# Altium schematic symbol library Centralize.SchLib: 1081 symbols (part 22 of 26)
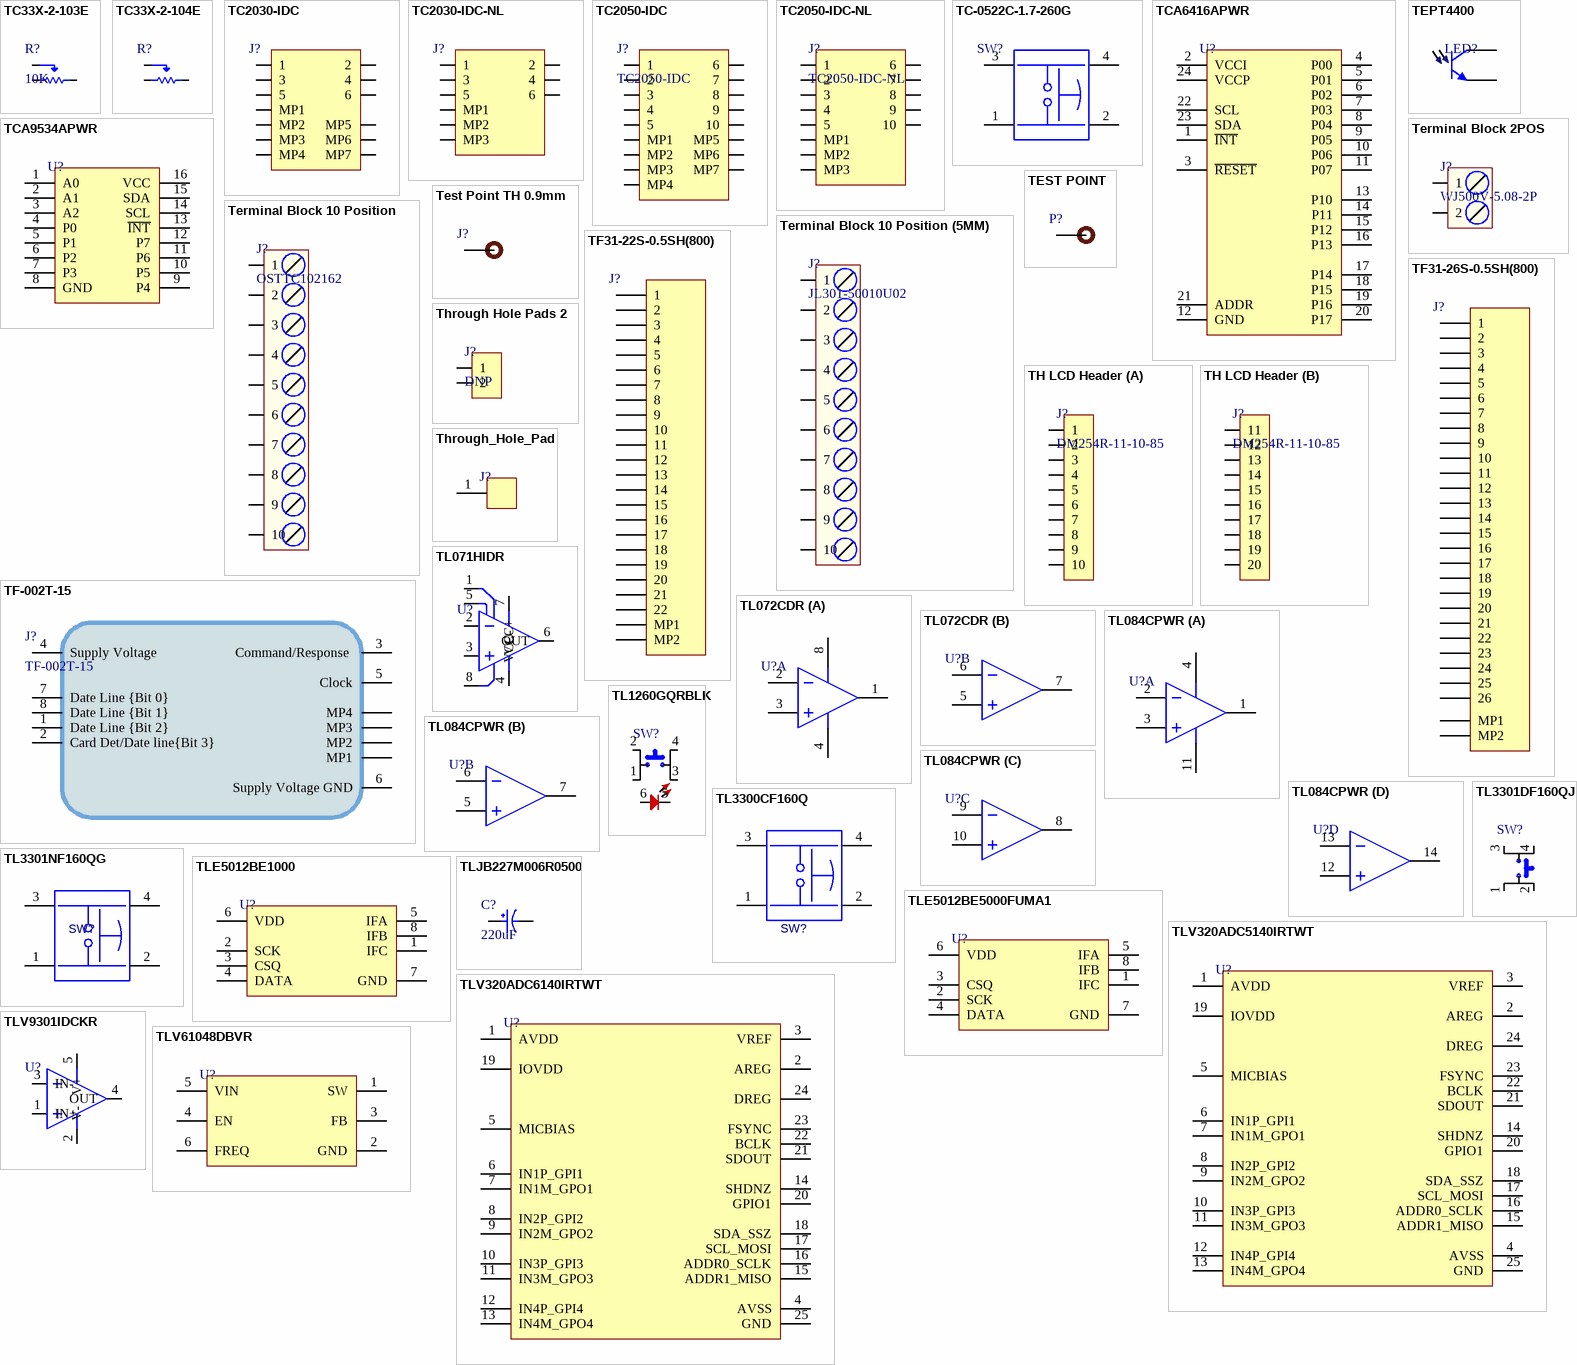
[diagram p68: symbols TC33X-2-103E to TLV61048DBVR]

## TLJB227M006R0500
designator C?, comment 220uF
CAP TANT 220UF 20% 6.3V SMD; Manufacturer: Kyocera AVX; Manufacturer Part Number: TLJB227M006R0500; Dielectric Material: Tantalum; Ripple Current: 412mA; ESR (Equivalent Series Resistance): 500mR; Leakage Current: 13.2uA; Polarity: Polar; Item Type: Capacitor; Supplier 1: Arrow Electronics; RoHS: Yes; Category: Tantalum Capacitors; Stock 1: 2000; Pricing 1: 2000=0.5308 (USD); Mounting Technology: Surface Mount; Case/Package: 1210; Pins: 2; Case Code (Imperial): 1411; Case Code (Metric): 3528; Min Operating Temperature: -55°C; Max Operating Temperature: 125°C; Package Quantity: 2000; Voltage Rating: 6.3V; Tolerance: 20%; Packaging: Tape and Reel; Value: 220uF; Termination: SMD/SMT; Voltage Rating (DC): 6.3V; Features: General Purpose; Series: TLJ; Construction: Flat; Length: 3.5mm; Width: 2.8mm; Height: 2.1mm; Height - Seated (Max): 0.083inch; Depth: 2.8mm; Radiation Hardening: No; Reach SVHC Compliant: No; RoHS Compliant: Yes; ComponentLink1URL: https://datasheet.ciiva.com/7773/tlj-7773835.pdf?src-supplier=Element14; ComponentLink1Description: https://datasheet.ciiva.com/7773/tlj-7773835.pdf?src-supplier=Element14; ComponentLink2URL: https://datasheet.ciiva.com/7773/tlj-7773836.pdf?src-supplier=Element14; ComponentLink2Description: https://datasheet.ciiva.com/7773/tlj-7773836.pdf?src-supplier=Element14; ComponentLink3URL: https://datasheet.ciiva.com/12911/tlj-35067-12911143.pdf?src-supplier=Mouser; ComponentLink3Description: https://datasheet.ciiva.com/12911/tlj-35067-12911143.pdf?src-supplier=Mouser; ComponentLink4URL: https://datasheet.ciiva.com/11229/tlj-11229391.pdf?src-supplier=Avnet; ComponentLink4Description: https://datasheet.ciiva.com/11229/tlj-11229391.pdf?src-supplier=Avnet; ComponentLink5URL: https://datasheet.ciiva.com/6238/tlj-6238526.pdf?src-supplier=Digi-Key; ComponentLink5Description: https://datasheet.ciiva.com/6238/tlj-6238526.pdf?src-supplier=Digi-Key; Supplier Part Number 1: TLJB227M006R0500; LCSC Part Number: C30242
footprint Case-B
pins: 1, 2

## TLV320ADC5140IRTWT
designator U?
IC ADC AUDIO 768K 24WQFN; Manufacturer: Texas Instruments; Manufacturer Part Number: TLV320ADC5140IRTWT; Supplier 1: Digi-Key; RoHS: Yes; Stock 1: 40; Pricing 1: 1=6.07000, 10=5.44900, 25=5.15160, 100=4.46470 (USD); RoHS Compliant: Yes; ComponentLink1URL: http://www.ti.com/general/docs/suppproductinfo.tsp?distId=10&amp;gotoUrl=http%3A%2F%2Fwww.ti.com%2Flit%2Fgpn%2Ftlv320adc5140&src-supplier=Digi-Key; ComponentLink1Description: http://www.ti.com/general/docs/suppproductinfo.tsp?distId=10&amp;gotoUrl=http%3A%2F%2Fwww.ti.com%2Flit%2Fgpn%2Ftlv320adc5140&src-supplier=Digi-Key; Supplier Part Number 1: 296-TLV320ADC5140IRTWTCT-ND; LCSC Part Number: C1852018; Item Type: IC
footprint 24-WQFN (4x4)
pins: 1 AVDD, 2 AREG, 3 VREF, 4 AVSS, 5 MICBIAS, 6 IN1P_GPI1, 7 IN1M_GPO1, 8 IN2P_GPI2, 9 IN2M_GPO2, 10 IN3P_GPI3, 11 IN3M_GPO3, 12 IN4P_GPI4, 13 IN4M_GPO4, 14 SHDNZ, 15 ADDR1_MISO, 16 ADDR0_SCLK, 17 SCL_MOSI, 18 SDA_SSZ, 19 IOVDD, 20 GPIO1, 21 SDOUT, 22 BCLK, 23 FSYNC, 24 DREG, 25 GND

## TLV320ADC6140IRTWT
designator U?
IC ADC AUDIO 768K 24WQFN; Manufacturer: Texas Instruments; Manufacturer Part Number: TLV320ADC6140IRTWT; Supplier 1: Digi-Key; RoHS: Yes; Category: Amplifiers - Audio; Stock 1: 4324; Pricing 1: 1=13.36000, 10=12.27500, 25=11.76600, 100=10.36680 (USD); ComponentLink1URL: http://www.ti.com/general/docs/suppproductinfo.tsp?distId=10&amp;gotoUrl=http%3A%2F%2Fwww.ti.com%2Flit%2Fgpn%2Ftlv320adc6140&src-supplier=Digi-Key; ComponentLink1Description: http://www.ti.com/general/docs/suppproductinfo.tsp?distId=10&amp;gotoUrl=http%3A%2F%2Fwww.ti.com%2Flit%2Fgpn%2Ftlv320adc6140&src-supplier=Digi-Key; Supplier Part Number 1: 296-TLV320ADC6140IRTWTCT-ND; LCSC Part Number: C1852023; Item Type: IC
footprint 24-WQFN (4x4)
pins: 1 AVDD, 2 AREG, 3 VREF, 4 AVSS, 5 MICBIAS, 6 IN1P_GPI1, 7 IN1M_GPO1, 8 IN2P_GPI2, 9 IN2M_GPO2, 10 IN3P_GPI3, 11 IN3M_GPO3, 12 IN4P_GPI4, 13 IN4M_GPO4, 14 SHDNZ, 15 ADDR1_MISO, 16 ADDR0_SCLK, 17 SCL_MOSI, 18 SDA_SSZ, 19 IOVDD, 20 GPIO1, 21 SDOUT, 22 BCLK, 23 FSYNC, 24 DREG, 25 GND

## TLV9301IDCKR
designator U?
IC OPAMP GP 1 CIRCUIT SC70-5; Manufacturer: Texas Instruments; Manufacturer Part Number: TLV9301IDCKR; Supplier 1: Mouser; RoHS: No; Category: Amplifiers - Op Amps, Buffer, Instrumentation; Stock 1: 29098; Pricing 1: 1=0.67, 10=0.562, 50=0.562, 100=0.445, 1000=0.284, 10000=0.283 (USD); Supplier Part Number 1: 595-TLV9301IDCKR; LCSC Part Number: C4366617; Item Type: IC
footprint SC-70-5
pins: 1 IN+, 2 V- (power), 3 IN-, 4 OUT, 5 V+ (power)

## TLV61048DBVR
designator U?
IC REG BOOST ADJ SOT23-6; Manufacturer: Texas Instruments; Manufacturer Part Number: TLV61048DBVR; Supplier 1: Arrow Electronics; RoHS: Yes; Category: Voltage Regulators - Switching; Stock 1: 2900; Pricing 1: 1=1.50040, 10=1.27670, 25=1.22540, 100=1.02980, 250=0.96320, 500=0.86780, 1000=0.76510 (USD); ComponentLink1URL: http://www.ti.com/general/docs/suppproductinfo.tsp?distId=10&amp;gotoUrl=http%3A%2F%2Fwww.ti.com%2Flit%2Fgpn%2Ftlv61048&src-supplier=Digi-Key; ComponentLink1Description: http://www.ti.com/general/docs/suppproductinfo.tsp?distId=10&amp;gotoUrl=http%3A%2F%2Fwww.ti.com%2Flit%2Fgpn%2Ftlv61048&src-supplier=Digi-Key; Supplier Part Number 1: TLV61048DBVR; Item Type: IC
footprint SOT-23-6
pins: 1 SW, 2 GND, 3 FB, 4 EN, 5 VIN, 6 FREQ

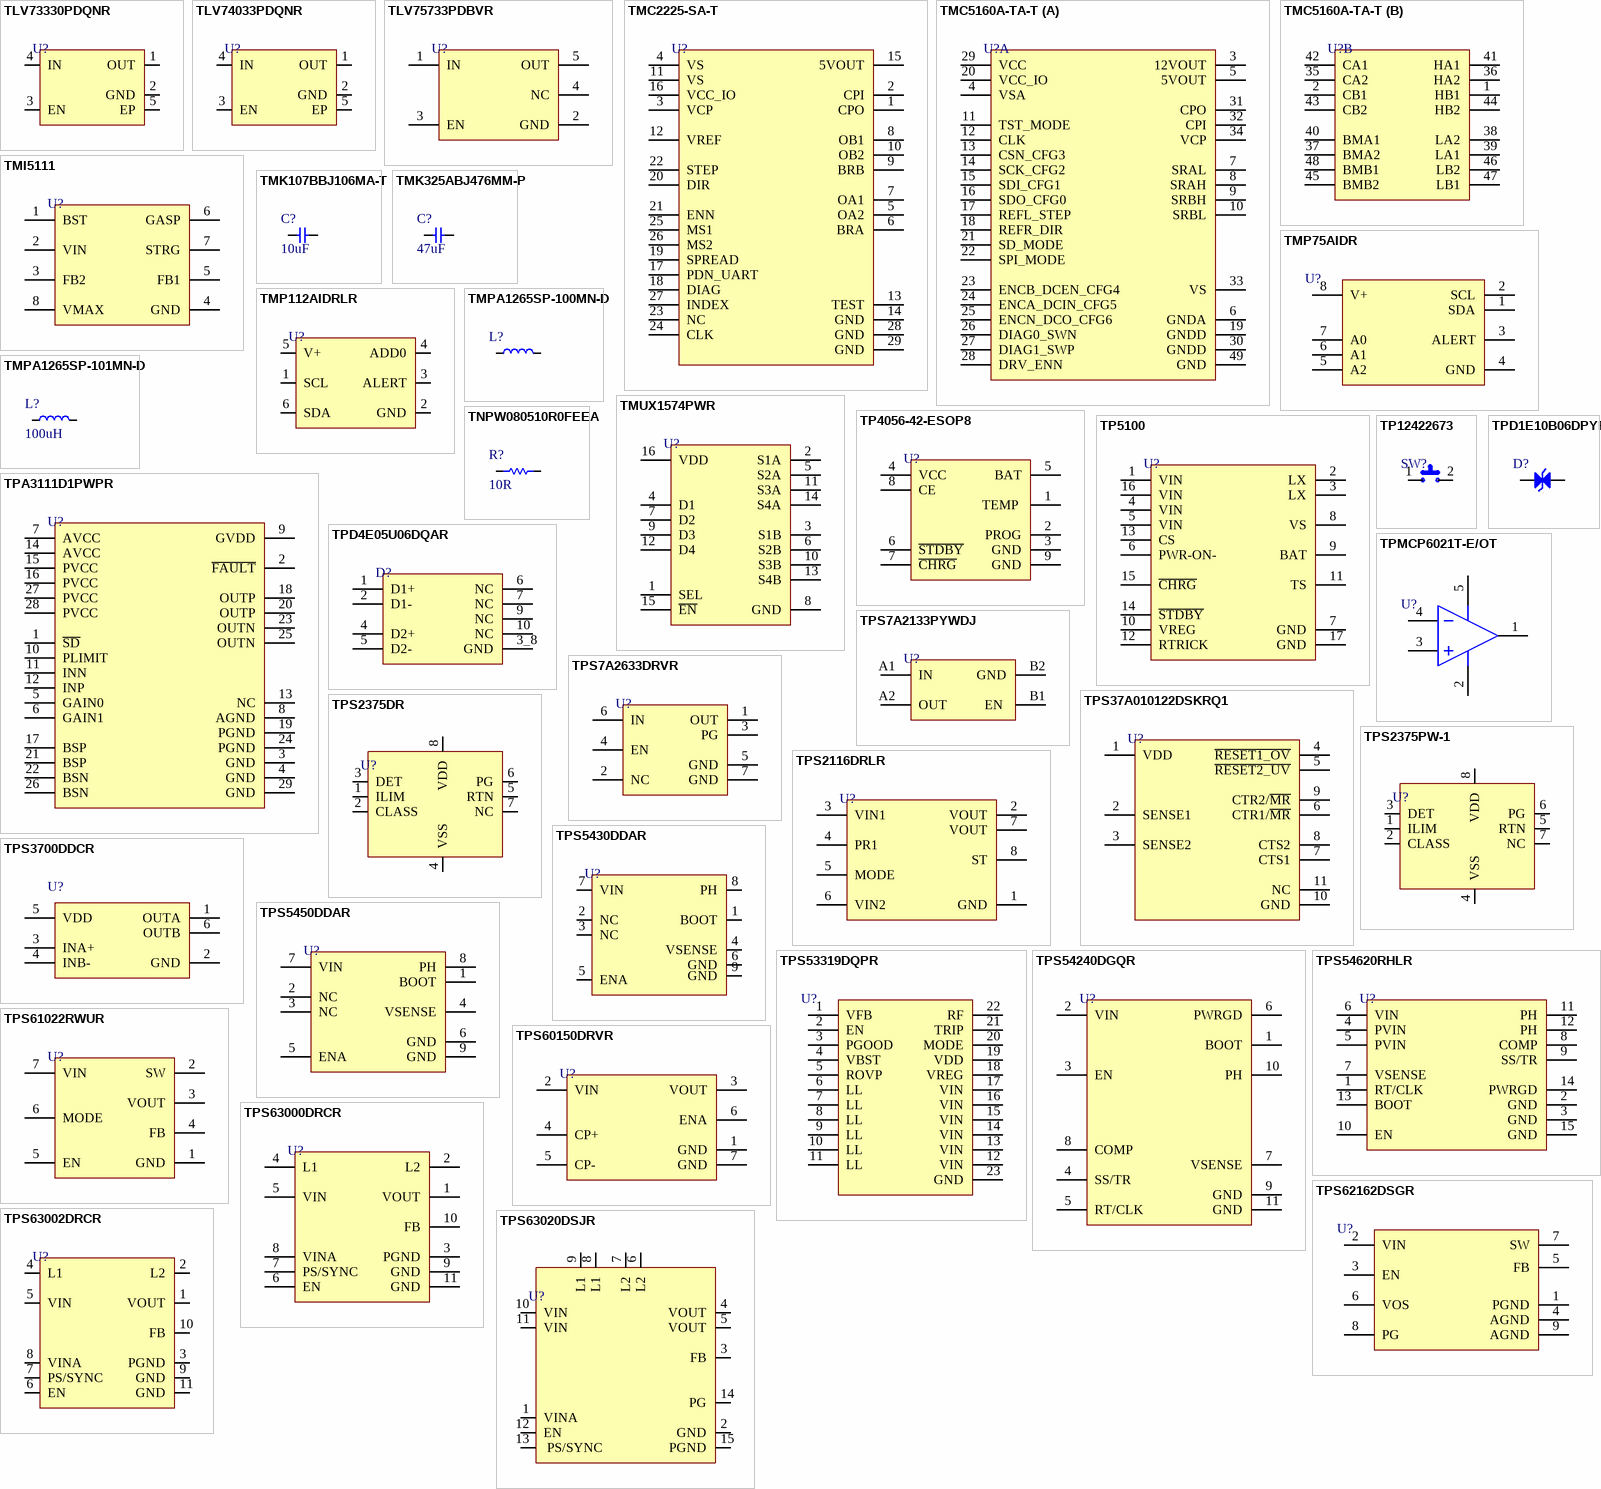
[diagram p42: symbols TLV73330PDQNR to TPS63020DSJR]

## TLV73330PDQNR
designator U?
IC REG LINEAR 3V 300MA 4X2SON; Manufacturer: Texas Instruments; Manufacturer Part Number: TLV73330PDQNR; Supplier: Mouser; Supplier Part Number: 595-TLV73330PDQNR; RoHS: Yes; Category: Voltage Regulators - Linear; Stock: 14746; Pricing: 1=0.39, 10=0.255, 50=0.255, 100=0.137, 1000=0.084, 10000=0.058 (USD); ComponentLink1URL: http://www.ti.com/general/docs/suppproductinfo.tsp?distId=10&amp;gotoUrl=http%3A%2F%2Fwww.ti.com%2Flit%2Fgpn%2Ftlv733p&src-supplier=Digi-Key; ComponentLink1Description: http://www.ti.com/general/docs/suppproductinfo.tsp?distId=10&amp;gotoUrl=http%3A%2F%2Fwww.ti.com%2Flit%2Fgpn%2Ftlv733p&src-supplier=Digi-Key; LCSC Part Number: C2870830; Item Type: IC
footprint X2-SON-4(1x1)
pins: 1 OUT, 2 GND, 3 EN, 4 IN, 5 EP

## TLV74033PDQNR
designator U?
IC REG LIN 3.3V 300MA 4X2SON; Manufacturer: Texas Instruments; Manufacturer Part Number: TLV74033PDQNR; Supplier: Mouser; Supplier Part Number: 595-TLV74033PDQNR; RoHS: No; Category: Integrated Circuits (ICs); Stock: 23519; Pricing: 1=0.25, 10=0.205, 50=0.205, 100=0.096, 1000=0.049, 10000=0.033 (USD); LCSC Part Number: C3746074; Item Type: IC
footprint X2-SON-4(1x1)
pins: 1 OUT, 2 GND, 3 EN, 4 IN, 5 EP

## TLV75733PDBVR
designator U?
IC REG LINEAR 3.3V 1A SOT23-5; Manufacturer: Texas Instruments; Manufacturer Part Number: TLV75733PDBVR; Output Type: Fixed; Capacitance: 33nF; Tolerance: 20%; Voltage Rating: 50V; Output Configuration: Positive; Number of Regulators: 1; Max Input Voltage: 5.5V; Dropout Voltage: 475mV; Max Supply Current: 40uA; Power Supply Rejection Ratio (PSRR): 52dB; Supplier 1: Mouser; RoHS: Yes; Category: Voltage Regulators - Linear; Pricing 1: 1=0.68000, 10=0.58100, 50=0.58100, 100=0.40300, 500=0.34100, 1000=0.26400, 3000=0.23900, 10000=0.23900 (USD); Mount: Surface Mount; Case/Package: 1206; Min Operating Temperature: -40°C; Max Operating Temperature: 125°C; Packaging: Tape and Reel; Min Output Voltage: 3.3V; Output Current: 1A; Ratings: AEC-Q200; RoHS Compliant: Yes; ComponentLink1URL: http://www.ti.com/lit/ds/symlink/tlv757p.pdf?src-supplier=Digi-Key; ComponentLink1Description: http://www.ti.com/lit/ds/symlink/tlv757p.pdf?src-supplier=Digi-Key; Supplier Part Number 1: 595-TLV75733PDBVR; LCSC Part Number: C485517; Item Type: IC
footprint SOT-23-5
pins: 1 IN, 2 GND, 3 EN, 4 NC, 5 OUT

## TMC2225-SA-T
designator U?
HTSSOP-28-EP-4.5mm Motor Driver ICs ROHS; Manufacturer: Trinamic; Manufacturer Part Number: TMC2225-SA-T; Item Type: IC; Supplier 1: Digi-Key; RoHS: No; Stock 1: 3967; Pricing 1: 1=3.51000, 10=3.15400, 25=2.98120, 100=2.58380, 250=2.45124, 500=2.19950, 1000=1.87500 (USD); Supplier Part Number 1: 1460-TMC2225-SA-TCT-ND; LCSC Part Number: C516358; ComponentLink1Description: LCSC; ComponentLink1URL: https://www.lcsc.com/product-detail/Motor-Driver-ICs_TRINAMIC-Motion-Control-GmbH-TMC2225-SA-T_C516358.html
footprint HTSSOP-28-EP-4.5mm_
pins: 1 CPO, 2 CPI, 3 VCP, 4 VS, 5 OA2, 6 BRA, 7 OA1, 8 OB1, 9 BRB, 10 OB2, 11 VS, 12 VREF, 13 TEST, 14 GND, 15 5VOUT, 16 VCC_IO, 17 PDN_UART, 18 DIAG, 19 SPREAD, 20 DIR, 21 ENN, 22 STEP, 23 NC, 24 CLK, 25 MS1, 26 MS2, 27 INDEX, 28 GND, 29 GND

## TMC5160A-TA-T
designator U?
IC MTR DRVR BIPOLAR 8-60V 48TQFP; Manufacturer: Trinamic; Manufacturer Part Number: TMC5160A-TA-T; Supplier 1: Digi-Key; RoHS: Yes; Stock 1: 15584; Pricing 1: 1=6.83000, 10=6.13000, 25=5.79560, 100=5.02280, 250=4.76524, 500=4.27582, 1000=3.64500 (USD); Supplier Part Number 1: 1460-TMC5160A-TA-TCT-ND; LCSC Part Number: C516354; ComponentLink1Description: LCSC; ComponentLink1URL: https://www.lcsc.com/product-detail/Motor-Driver-ICs_TRINAMIC-Motion-Control-GmbH-TMC5160A-TA-T_C516354.html; Item Type: IC
footprint 48-TQFP-EP(7x7)
part A pins: 3 12VOUT, 4 VSA, 5 5VOUT, 6 GNDA, 7 SRAL, 8 SRAH, 9 SRBH, 10 SRBL, 11 TST_MODE, 12 CLK, 13 CSN_CFG3, 14 SCK_CFG2, 15 SDI_CFG1, 16 SDO_CFG0, 17 REFL_STEP, 18 REFR_DIR, 19 GNDD, 20 VCC_IO, 21 SD_MODE, 22 SPI_MODE, 23 ENCB_DCEN_CFG4, 24 ENCA_DCIN_CFG5, 25 ENCN_DCO_CFG6, 26 DIAG0_SWN, 27 DIAG1_SWP, 28 DRV_ENN, 29 VCC, 30 GNDD, 31 CPO, 32 CPI, 33 VS, 34 VCP, 49 GND
part B pins: 1 HB1, 2 CB1, 35 CA2, 36 HA2, 37 BMA2, 38 LA2, 39 LA1, 40 BMA1, 41 HA1, 42 CA1, 43 CB2, 44 HB2, 45 BMB2, 46 LB2, 47 LB1, 48 BMB1

## TMI5111
designator U?
SOP-8 Power Management Specialized - PMIC ROHS; Manufacturer: TMI; Manufacturer Part Number: TMI5111; Item Type: IC; Package: SOP-8; LCSC Part Number: C478953; ComponentLink1Description: LCSC; ComponentLink1URL: https://www.lcsc.com/product-detail/Power-Management-Specialized-PMIC_span-style-background-color-ff0-TMI-span-TMI5111_C478953.html
footprint SOP-8
pins: 1 BST, 2 VIN, 3 FB2, 4 GND, 5 FB1, 6 GASP, 7 STRG, 8 VMAX

## TMK107BBJ106MA-T
designator C?, comment 10uF
CAP CER 10UF 25V X5R 0603; Manufacturer: Taiyo Yuden; Manufacturer Part Number: TMK107BBJ106MA-T; Tolerance: 20%; Supplier 1: Digi-Key; Stock 1: 85333; Pricing 1: 1=0.46, 10=0.32, 50=0.2238, 100=0.1918, 500=0.14386, 1000=0.12149 (USD); Mount: Surface Mount; Case/Package: 0603; Case Code (Imperial): 0603; Case Code (Metric): 1608; Min Operating Temperature: -55°C; Max Operating Temperature: 85°C; Packaging: Tape and Reel; Capacitance: 10uF; Voltage Rating: 25V; Lead Free: Lead Free; RoHS Compliant: Yes; ComponentLink1URL: http://ds.yuden.co.jp/TYCOMPAS/ut/detail.do?productNo=TMK107BBJ106MA-T&fileName=TMK107BBJ106MA-T_SS&mode=specSheetDownload&src-supplier=Digi-Key; ComponentLink1Description: http://ds.yuden.co.jp/TYCOMPAS/ut/detail.do?productNo=TMK107BBJ106MA-T&fileName=TMK107BBJ106MA-T_SS&mode=specSheetDownload&src-supplier=Digi-Key; Supplier Part Number 1: 587-6023-1-ND; LCSC Part Number: C386081
footprint CAP-0603
pins: 1, 2

## TMK325ABJ476MM-P
designator C?, comment 47uF
CAP CER 47uF 25V 1210; Manufacturer: Taiyo Yuden; Manufacturer Part Number: TMK325ABJ476MM-P; Dielectric: X5R; Tolerance: 20%; Supplier 1: RSComponents; RoHS: Yes; Category: Ceramic Capacitors; Stock 1: 1000; Pricing 1: 1000=0.37500 (GBP); Mount: Surface Mount; Case/Package: Ceramic; Contact Plating: Tin; Min Operating Temperature: -55°C; Max Operating Temperature: 85°C; Capacitance: 47uF; Termination: Wraparound; Packaging: Tape and Reel; Length: 3.2mm; Lead Free: Lead Free; RoHS Compliant: Yes; ComponentLink1URL: http://www.yuden.co.jp/productdata/catalog/en/mlcc_all_e.pdf?src-supplier=Avnet+Asia; ComponentLink1Description: http://www.yuden.co.jp/productdata/catalog/en/mlcc_all_e.pdf?src-supplier=Avnet+Asia; ComponentLink2URL: http://ds.yuden.co.jp/TYCOMPAS/ut/detail.do?productNo=TMK325ABJ476MM-P&fileName=TMK325ABJ476MM-P_SS&mode=specSheetDownload&src-supplier=Digi-Key; ComponentLink2Description: http://ds.yuden.co.jp/TYCOMPAS/ut/detail.do?productNo=TMK325ABJ476MM-P&fileName=TMK325ABJ476MM-P_SS&mode=specSheetDownload&src-supplier=Digi-Key; ComponentLink3URL: https://ds.yuden.co.jp/TYCOMPAS/ut/detail?pn=TMK325ABJ476MM-P &amp;u=M&src-supplier=Digi-Key; ComponentLink3Description: https://ds.yuden.co.jp/TYCOMPAS/ut/detail?pn=TMK325ABJ476MM-P &amp;u=M&src-supplier=Digi-Key; Supplier Part Number 1: 1782936; LCSC Part Number: C90142
footprint Cap-1210 (SMD 1210)
pins: 1, 2

## TMP75AIDR
designator U?
SENSOR DIGITAL -40C-125C 8SOIC; Manufacturer: Texas Instruments; Manufacturer Part Number: TMP75AIDR; Min Supply Voltage: 2.7V; Max Supply Voltage: 5.5V; Interface: I2C,SMBus,2-Wire; Resolution: 12b; Operating Supply Current: 85uA; Quiescent Current: 50uA; Number of Bits: 12; Output Current: 3mA; Nominal Supply Current: 410uA; Output Voltage: 400mV; Supplier 1: Digi-Key; RoHS: Yes; Category: Integrated Circuits (ICs); Pricing 1: 1=1.20000, 5=1.15200, 10=0.93600, 25=0.80640, 50=0.69840, 100=0.63360, 500=0.53280, 1000=0.50400 (USD); Mount: Surface Mount; Case/Package: SOIC; Number of Pins: 8; Weight: 0.002677oz; Contact Plating: Gold; Min Operating Temperature: -40°C; Max Operating Temperature: 125°C; Packaging: Tape and Reel; Package Quantity: 1; Max Supply Voltage (DC): 5.5V; Min Supply Voltage (DC): 2.7V; Output Type: Digital; Termination: SMD/SMT; Radiation Hardening: No; Lead Free: Lead Free; RoHS Compliant: Yes; REACH SVHC: No SVHC; ComponentLink1URL: https://datasheet.ciiva.com/15098/getdatasheetpartid-313967-15098447.pdf?src-supplier=Verical; ComponentLink1Description: https://datasheet.ciiva.com/15098/getdatasheetpartid-313967-15098447.pdf?src-supplier=Verical; ComponentLink2URL: https://datasheet.ciiva.com/46395/1836472-46395973.pdf?src-supplier=Element14; ComponentLink2Description: https://datasheet.ciiva.com/46395/1836472-46395973.pdf?src-supplier=Element14; ComponentLink3URL: https://datasheet.ciiva.com/2002/tmp175-2002986.pdf?src-supplier=Digi-Key; ComponentLink3Description: https://datasheet.ciiva.com/2002/tmp175-2002986.pdf?src-supplier=Digi-Key; ComponentLink4URL: https://datasheet.ciiva.com/2002/tmp175-2002985.pdf?src-supplier=Digi-Key; ComponentLink4Description: https://datasheet.ciiva.com/2002/tmp175-2002985.pdf?src-supplier=Digi-Key; ComponentLink5URL: https://datasheet.ciiva.com/2002/tmp175-2002987.pdf?src-supplier=Digi-Key; ComponentLink5Description: https://datasheet.ciiva.com/2002/tmp175-2002987.pdf?src-supplier=Digi-Key; ComponentLink6URL: https://datasheet.ciiva.com/1514/1836472-1514144.pdf?src-supplier=Element14; ComponentLink6Description: https://datasheet.ciiva.com/1514/1836472-1514144.pdf?src-supplier=Element14; ComponentLink7URL: https://datasheet.ciiva.com/1514/1836472-1514145.pdf?src-supplier=Element14; ComponentLink7Description: https://datasheet.ciiva.com/1514/1836472-1514145.pdf?src-supplier=Element14; ComponentLink8URL: https://datasheet.ciiva.com/26240/tmp75-26240250.pdf?src-supplier=Avnet+Europe; ComponentLink8Description: https://datasheet.ciiva.com/26240/tmp75-26240250.pdf?src-supplier=Avnet+Europe; Supplier Part Number 1: 296-17838-1-ND; LCSC Part Number: C30389
footprint SOIC-8
pins: 1 SDA, 2 SCL, 3 ALERT, 4 GND, 5 A2, 6 A1, 7 A0, 8 V+

## TMP112AIDRLR
designator U?
SOT-563 TEMPERATURE SENSORS ROHS; Manufacturer: Texas Instruments; Manufacturer Part Number: TMP112AIDRLR; Item Type: IC; Supplier: Arrow Electronics; Supplier Part Number: TMP112AIDRLR; RoHS: Yes; Category: Integrated Circuits (ICs); Stock: 797; Pricing: 1=1.0774, 10=0.9979, 25=0.988, 100=0.9781, 250=0.9757, 500=0.9733 (USD); ComponentLink1URL: https://datasheet.ciiva.com/15098/getdatasheetpartid-189592-15098348.pdf?src-supplier=Verical; ComponentLink1Description: https://datasheet.ciiva.com/15098/getdatasheetpartid-189592-15098348.pdf?src-supplier=Verical; ComponentLink2URL: https://datasheet.ciiva.com/2004/tmp112-2004135.pdf?src-supplier=Digi-Key; ComponentLink2Description: https://datasheet.ciiva.com/2004/tmp112-2004135.pdf?src-supplier=Digi-Key; ComponentLink3URL: https://datasheet.ciiva.com/3278/tmp112-3278379.pdf?src-supplier=Avnet; ComponentLink3Description: https://datasheet.ciiva.com/3278/tmp112-3278379.pdf?src-supplier=Avnet; LCSC Part Number: C28927
footprint SOT-563
pins: 1 SCL, 2 GND, 3 ALERT, 4 ADD0, 5 V+, 6 SDA

## TMPA1265SP-100MN-D
designator L?
13A 10uH ±20% 17A SMD,12.6x13.5mm Power Inductors ROHS; Manufacturer: TAI-TECH; Manufacturer Part Number: TMPA1265SP-100MN-D; Package: SMD,12.6x13.5mm; LCSC Part Number: C2880060; Item Type: Inductor; ComponentLink1Description: LCSC; ComponentLink1URL: https://www.lcsc.com/product-detail/Power-Inductors_TAI-TECH-TMPA1265SP-100MN-D_C2880060.html
footprint TMPA1265SP-100MN-D
pins: 1, 2

## TMPA1265SP-101MN-D
designator L?, comment 100uH
3.8A 100uH ±20% SMD,12.6x13.5mm Power Inductors ROHS; Manufacturer: TAI-TECH; Manufacturer Part Number: TMPA1265SP-101MN-D; Package: SMD,12.6x13.5mm; LCSC Part Number: C357118; Item Type: Inductor; ComponentLink1Description: LCSC; ComponentLink1URL: https://www.lcsc.com/product-detail/Power-Inductors_TAI-TECH-TMPA1265SP-101MN-D_C357118.html
footprint TMPA1265SP-101MN-D
pins: 1, 2

## TMUX1574PWR
designator U?
IC SWITCH SPDTX4 4.5OHM 16TSSOP; Manufacturer: Texas Instruments; Manufacturer Part Number: TMUX1574PWR; Number of Circuits: 4; -3db Bandwidth: 2GHz; Supplier 1: Mouser; RoHS: Yes; Category: Interface ICs; Stock 1: 17133; Pricing 1: 1=0.87, 10=0.763, 50=0.763, 100=0.585, 1000=0.37, 10000=0.335 (USD); Case/Package: TSSOP; Min Operating Temperature: -40°C; Max Operating Temperature: 125°C; Packaging: Cut Tape; RoHS Compliant: Yes; ComponentLink1URL: https://datasheet.ciiva.com/72066/-72066498.pdf?src-supplier=Digi-Key; ComponentLink1Description: https://datasheet.ciiva.com/72066/-72066498.pdf?src-supplier=Digi-Key; Supplier Part Number 1: 595-TMUX1574PWR; LCSC Part Number: C2673443; Item Type: IC
footprint 16-TSSOP (0.173", 4.40mm Width)
pins: 1 SEL, 2 S1A, 3 S1B, 4 D1, 5 S2A, 6 S2B, 7 D2, 8 GND, 9 D3, 10 S3B, 11 S3A, 12 D4, 13 S4B, 14 S4A, 15 ~{EN}, 16 VDD

## TNPW080510R0FEEA
designator R?, comment 10R
RES 10 OHM 1% 1/8W 0805; Manufacturer: Vishay; Manufacturer Part Number: TNPW080510R0FEEA; Power Rating: 125mW; Voltage Rating: 150V; Temperature Coefficient: 25ppm/°C; Item Type: Resistor; Supplier 1: Mouser; RoHS: Yes; Category: Chip SMD Resistors; Stock 1: 22670; Pricing 1: 1=0.57000, 10=0.43800, 50=0.43800, 100=0.18500, 500=0.13400, 1000=0.10200, 2500=0.09600, 5000=0.08500, 10000=0.08500 (USD); Mounting Technology: Surface Mount; Case/Package: 0805; Case Code (Imperial): 0805; Case Code (Metric): 2012; Weight: 0.000194oz; Contact Plating: Tin; Min Operating Temperature: -55°C; Max Operating Temperature: 125°C; Value: 10R; Tolerance: 1%; Packaging: Tape and Reel; Resistor Type: Thin Film; Termination: SMD/SMT; Series: TNPW e3; Technology: THIN FILM; Length: 2mm; Width: 1.2mm; Height: 0.45mm; Depth: 1.25mm; Radiation Hardening: No; Lead Free: Lead Free; RoHS Compliant: Yes; ComponentLink1URL: https://datasheet.ciiva.com/16787/70201627-16787918.pdf?src-supplier=Allied+Electronics; ComponentLink1Description: https://datasheet.ciiva.com/16787/70201627-16787918.pdf?src-supplier=Allied+Electronics; Supplier Part Number 1: 71-TNPW080510R0FEEA; LCSC Part Number: C844061
footprint RES-0805 (SMD 0805)
pins: 1, 2

## TP4056-42-ESOP8
designator U?
ESOP-8 Battery Management ICs ROHS; Manufacturer: TOPPOWER; Manufacturer Part Number: TP4056-42-ESOP8; Item Type: Mosfet; Package: ESOP-8; LCSC Part Number: C16581; ComponentLink1Description: LCSC; ComponentLink1URL: https://www.lcsc.com/product-detail/Battery-Management-ICs_TOPPOWER-Nanjing-Extension-Microelectronics-TP4056-42-ESOP8_C16581.html
footprint ESOP-8
pins: 1 TEMP , 2 PROG, 3 GND, 4 VCC, 5 BAT, 6 ~{STDBY}, 7 ~{CHRG}, 8 CE, 9 GND

## TP5100
designator U?
TQFN-16-EP(4x4) Battery Management ICs ROHS; Manufacturer: TOPPOWER(Nanjing Extension Microelectronics); Manufacturer Part Number: TP5100; Item Type: IC; Package: TQFN-16-EP(4x4); LCSC Part Number: C379389; ComponentLink1Description: LCSC; ComponentLink1URL: https://www.lcsc.com/product-detail/Battery-Management-ICs_TOPPOWER-Nanjing-Extension-Microelectronics-TP5100_C379389.html
footprint TQFN-16-EP(4x4)_
pins: 1 VIN, 2 LX, 3 LX, 4 VIN, 5 VIN, 6 PWR-ON-, 7 GND, 8 VS, 9 BAT, 10 VREG, 11 TS, 12 RTRICK, 13 CS, 14 ~{STDBY}, 15 ~{CHRG}, 16 VIN, 17 GND

## TP12422673
designator SW?
50mA 100MΩ 100000 Times 260gf@±50gf 12V Surface Mount SPST SMD Tactile Switches ROHS; Manufacturer: ROCPU Switch; Manufacturer Part Number: TP12422673; Package: SMD; LCSC Part Number: C5381384; Item Type: Tactile Switch; ComponentLink1Description: LCSC; ComponentLink1URL: https://www.lcsc.com/product-detail/Tactile-Switches_ROCPU-Switches-TP12422673_C5381384.html
footprint TP12422673
pins: 1, 2

## TPA3111D1PWPR
designator U?
Amplifier IC 1-Channel (Mono) Class D 28-HTSSOP; Manufacturer: Texas Instruments; Manufacturer Part Number: TPA3111D1PWPR; Output Power: 10W; Min Supply Voltage: 8V; Max Supply Voltage: 26V; Nominal Supply Current: 40mA; Power Dissipation: 4.98W; Number of Channels: 1; Voltage Gain: 36dB; Gain: 37dB; Load Impedance: 8R; Supplier 1: Mouser; RoHS: Yes; Category: Amplifiers - Audio; Pricing 1: 1=2.26000, 10=2.04000, 25=1.92000, 50=1.92000, 100=1.64000, 250=1.54000, 500=1.35000, 1000=1.12000, 2000=1.11000, 10000=1.11000 (USD); Case/Package: HTSSOP; Number of Pins: 28; Min Operating Temperature: -40°C; Max Operating Temperature: 85°C; Packaging: Tape and Reel; Package Quantity: 2000; Max Output Power: 10W; Series: SpeakerGuard™; Supply Current: 40mA; Radiation Hardening: No; Lead Free: Lead Free; RoHS Compliant: Yes; REACH SVHC: No SVHC; ComponentLink1URL: https://datasheet.ciiva.com/15131/getdatasheetpartid-376403-15131942.pdf?src-supplier=Verical; ComponentLink1Description: https://datasheet.ciiva.com/15131/getdatasheetpartid-376403-15131942.pdf?src-supplier=Verical; ComponentLink2URL: https://datasheet.ciiva.com/2969/tpa3111d1-2969959.pdf?src-supplier=Avnet; ComponentLink2Description: https://datasheet.ciiva.com/2969/tpa3111d1-2969959.pdf?src-supplier=Avnet; ComponentLink3URL: https://datasheet.ciiva.com/1789/tpa3111d1-1789051.pdf?src-supplier=Digi-Key; ComponentLink3Description: https://datasheet.ciiva.com/1789/tpa3111d1-1789051.pdf?src-supplier=Digi-Key; Supplier Part Number 1: 595-TPA3111D1PWPR; LCSC Part Number: C114457
footprint 28-HTSSOP_
pins: 1 ~{SD}, 2 ~{FAULT}, 3 GND, 4 GND, 5 GAIN0, 6 GAIN1, 7 AVCC, 8 AGND, 9 GVDD, 10 PLIMIT, 11 INN, 12 INP, 13 NC, 14 AVCC, 15 PVCC, 16 PVCC, 17 BSP, 18 OUTP, 19 PGND, 20 OUTP, 21 BSP, 22 BSN, 23 OUTN, 24 PGND, 25 OUTN, 26 BSN, 27 PVCC, 28 PVCC, 29 GND

## TPD1E10B06DPYR
designator D?
DIODE TVS SMD 5.5V 5A 90W; Manufacturer: Texas Instruments; Manufacturer Part Number: TPD1E10B06DPYR; Capacitance: 12pF; Direction: Bidirectional; Breakdown Voltage: 6V; Number of Channels: 1; Clamping Voltage: 14V; Power Line Protection: No; Leakage Current: 100nA; ESD Protection: Yes; Test Current: 1mA; Element Configuration: Single; Interface: GPIO; Diode Type: ZENER; Supplier 1: Mouser; RoHS: Yes; Category: TVS Diodes; Pricing 1: 1=0.39000, 10=0.29800, 50=0.29800, 100=0.18600, 500=0.12700, 1000=0.09800, 2500=0.08300, 10000=0.07500 (USD); Case/Package: SON; Number of Pins: 2; Contact Plating: Gold; Min Operating Temperature: -40°C; Max Operating Temperature: 125°C; Package Quantity: 1; Packaging: Tape and Reel; Number of Bidirectional Channels: 1; Reverse Standoff Voltage: 5.5V; Min Breakdown Voltage: 6V; Peak Pulse Power: 90W; Working Voltage: 5.5V; Max Reverse Leakage Current: 100nA; Peak Pulse Current: 5A; Resistor Type: Zener; Series: -; Length: 1.1mm; Width: 0.7mm; Height: 0.35mm; Radiation Hardening: No; REACH SVHC: No SVHC; Lead Free: Lead Free; RoHS Compliant: Yes; ComponentLink1URL: https://datasheet.ciiva.com/22691/1877100-22691786.pdf?src-supplier=Element14; ComponentLink1Description: https://datasheet.ciiva.com/22691/1877100-22691786.pdf?src-supplier=Element14; ComponentLink2URL: https://datasheet.ciiva.com/46384/1877100-46384054.pdf?src-supplier=Element14; ComponentLink2Description: https://datasheet.ciiva.com/46384/1877100-46384054.pdf?src-supplier=Element14; ComponentLink3URL: https://datasheet.ciiva.com/2961/tpd1e10b06-2961245.pdf?src-supplier=Digi-Key; ComponentLink3Description: https://datasheet.ciiva.com/2961/tpd1e10b06-2961245.pdf?src-supplier=Digi-Key; ComponentLink4URL: https://datasheet.ciiva.com/6574/tpd1e10b06-6574654.pdf?src-supplier=Digi-Key; ComponentLink4Description: https://datasheet.ciiva.com/6574/tpd1e10b06-6574654.pdf?src-supplier=Digi-Key; ComponentLink5URL: https://datasheet.ciiva.com/2961/tpd1e10b06-2961246.pdf?src-supplier=Digi-Key; ComponentLink5Description: https://datasheet.ciiva.com/2961/tpd1e10b06-2961246.pdf?src-supplier=Digi-Key; ComponentLink6URL: https://datasheet.ciiva.com/14195/tpd1e10b06-14195178.pdf?src-supplier=Avnet; ComponentLink6Description: https://datasheet.ciiva.com/14195/tpd1e10b06-14195178.pdf?src-supplier=Avnet; Supplier Part Number 1: 595-TPD1E10B06DPYR
footprint X1SON (TVS 6A@80/20µs 14V 6V 5.5V@(MAX))
pins: 1 K, 2 A

## TPD4E05U06DQAR
designator D?
uSON-10 ESD Protection Devices ROHS; Manufacturer: TECH PUBLIC; Manufacturer Part Number: TPD4E05U06DQAR; Item Type: Diode; ComponentLink1Description: LCSC; ComponentLink1URL: https://lcsc.com/product-detail/ESD-Protection-Devices_TECH-PUBLIC-TPD4E05U06DQAR_C2827646.html; Footprint: uSON-10; LCSC Part Number: C2827646
footprint uSON_10
pins: 1 D1+, 2 D1-, 3_8 GND, 4 D2+, 5 D2-, 6 NC, 7 NC, 9 NC, 10 NC

## TPMCP6021T-E/OT
designator U?
SOT-23-5 Operational Amplifier ROHS; Manufacturer Part Number: TPMCP6021T-E/OT; Manufacturer: TECH PUBLIC; Item Type: IC; Footprint: SOT-23-5; LCSC Part Number: C2923365; ComponentLink1Description: LCSC; ComponentLink1URL: https://www.lcsc.com/product-detail/Operational-Amplifier_TECH-PUBLIC-TPMCP6021T-E-OT_C2923365.html
footprint SOT-23-5
pins: 1 OUT, 2 V- (power), 3 IN+, 4 IN-, 5 V+ (power)

## TPS7A2133PYWDJ
designator U?
500-MA, LOW-NOISE, LOW-IQ, HIGH; Manufacturer: Texas Instruments; Manufacturer Part Number: TPS7A2133PYWDJ; Item Type: IC; Package: Custom; LCSC Part Number: C3019997; ComponentLink1Description: LCSC; ComponentLink1URL: https://www.lcsc.com/product-detail/Linear-Voltage-Regulators-LDO_Texas-Instruments-TPS7A2133PYWDJ_C3019997.html
footprint 4-WCSP (0.63x0.63)
pins: A1 IN , A2 OUT, B1 EN , B2 GND

## TPS7A2633DRVR
designator U?
IC REG LINEAR 3.3V 500MA 6WSON; Manufacturer: Texas Instruments; Manufacturer Part Number: TPS7A2633DRVR; Supplier 1: Digi-Key; RoHS: Yes; Category: Voltage Regulators - Linear; Pricing 1: 1=1.07000, 10=0.95400, 25=0.90520, 100=0.74360, 250=0.69508, 500=0.61428, 1000=0.48495 (USD); ComponentLink1URL: http://www.ti.com/general/docs/suppproductinfo.tsp?distId=10&amp;gotoUrl=http%3A%2F%2Fwww.ti.com%2Flit%2Fgpn%2Ftps7a26&src-supplier=Digi-Key; ComponentLink1Description: http://www.ti.com/general/docs/suppproductinfo.tsp?distId=10&amp;gotoUrl=http%3A%2F%2Fwww.ti.com%2Flit%2Fgpn%2Ftps7a26&src-supplier=Digi-Key; Supplier Part Number 1: 296-TPS7A2633DRVRCT-ND; LCSC Part Number: C2876256; Item Type: IC
footprint WSON-6(2x2)
pins: 1 OUT, 2 NC, 3 PG, 4 EN, 5 GND, 6 IN, 7 GND

## TPS37A010122DSKRQ1
designator U?
AUTOMOTIVE 65-V WINDOW SUPERVISO; Manufacturer: Texas Instruments; Manufacturer Part Number: TPS37A010122DSKRQ1; Item Type: IC; Supplier 1: Mouser; RoHS: No; Category: Voltage Supervisors; Stock 1: 2999; Pricing 1: 1=4.29000, 10=3.86000, 50=3.65000, 100=3.16000, 1000=2.35000, 10000=2.34000 (USD); LCSC Part Number: C3686483; Supplier Part Number 1: 595-S37A010122DSKRQ1
footprint WSON-10(2.5x2.5).
pins: 1 VDD, 2 SENSE1, 3 SENSE2, 4 ~{RESET1_OV}, 5 ~{RESET2_UV}, 6 CTR1/~{MR}, 7 CTS1, 8 CTS2, 9 CTR2/~{MR}, 10 GND, 11 NC

## TPS2116DRLR
designator U?
1.6-V TO 5.5-V, 40-M, 2.5-A, LOW; Manufacturer: Texas Instruments; Manufacturer Part Number: TPS2116DRLR; Item Type: IC; Supplier 1: Mouser; RoHS: Yes; Category: Voltage Supervisors; Stock 1: 27931; Pricing 1: 1=0.9, 10=0.814, 50=0.772, 100=0.634, 1000=0.414, 10000=0.363 (USD); Supplier Part Number 1: 595-TPS2116DRLR; LCSC Part Number: C3235557; ComponentLink1Description: LCSC; ComponentLink1URL: https://www.lcsc.com/product-detail/Power-Distribution-Switches_Texas-Instruments-TPS2116DRLR_C3235557.html
footprint SOT-583
pins: 1 GND, 2 VOUT, 3 VIN1, 4 PR1, 5 MODE, 6 VIN2, 7 VOUT, 8 ST

## TPS2375DR
designator U?
IC POE CNTRL 1 CHANNEL 8SOIC; Manufacturer: Texas Instruments; Manufacturer Part Number: TPS2375DR; Max Power Dissipation: 12.95W; Operating Supply Current: 240uA; Min Current Limit: 405mA; Output Current: 450mA; Number of Channels: 1; Max Supply Voltage: 57V; Min Supply Voltage: 0V; Power Dissipation: 13W; Supplier 1: Mouser; RoHS: Yes; Category: Interface ICs; Stock 1: 12566; Pricing 1: 1=2.94, 10=2.65, 50=2.5, 100=2.13, 1000=1.45, 10000=1.29 (USD); Case/Package: D; Pins: 8; Weight: 0.002561oz; Min Operating Temperature: -40°C; Max Operating Temperature: 85°C; Packaging: Tape and Reel; Package Quantity: 2500; Series: -; Length: 5mm; Height: 1.58mm; Radiation Hardening: No; Lead Free: Lead Free; RoHS Compliant: Yes; ComponentLink1URL: https://datasheet.ciiva.com/1943/tps2375-1943071.pdf?src-supplier=Digi-Key; ComponentLink1Description: https://datasheet.ciiva.com/1943/tps2375-1943071.pdf?src-supplier=Digi-Key; ComponentLink2URL: https://datasheet.ciiva.com/1943/tps2375-1943070.pdf?src-supplier=Digi-Key; ComponentLink2Description: https://datasheet.ciiva.com/1943/tps2375-1943070.pdf?src-supplier=Digi-Key; ComponentLink3URL: https://datasheet.ciiva.com/1943/tps2375-1943072.pdf?src-supplier=Digi-Key; ComponentLink3Description: https://datasheet.ciiva.com/1943/tps2375-1943072.pdf?src-supplier=Digi-Key; ComponentLink4URL: https://datasheet.ciiva.com/14248/tps2375-14248055.pdf?src-supplier=Avnet; ComponentLink4Description: https://datasheet.ciiva.com/14248/tps2375-14248055.pdf?src-supplier=Avnet; Supplier Part Number 1: 595-TPS2375DR; LCSC Part Number: C2867397; Item Type: IC
footprint SOIC-8
pins: 1 ILIM "Connect a resistor from ILIM to VSS to set the start-up inrush current limit. The equation for calculating the resistor is shown in the detailed pin description section for ILIM.", 2 CLASS "Connect a resistor from CLASS to VSS to set the classification of the powered device  (PD).", 3 DET "Connect a 24.9-k ohm detection resistor from DET to VDD for a valid PD detection.", 4 VSS "Return line on the source side of the TPS2375-1 from the PSE.", 5 RTN "Switched output side return line used as the low-side reference for the TPS2375-1 load.", 6 PG "Open-drain, power-good output; active high.", 7 NC "No connection", 8 VDD "Positive line from the rectified PSE provided input."

## TPS2375PW-1
designator U?
IC POE CNTRL 1 CHANNEL 8TSSOP; Manufacturer: Texas Instruments; Manufacturer Part Number: TPS2375PW-1; Max Supply Voltage: 57V; Min Supply Voltage: 0V; Max Power Dissipation: 12.95W; Output Current: 450mA; Power Dissipation: 13W; Operating Supply Current: 240uA; Min Current Limit: 405mA; Number of Channels: 1; Output Voltage: 400mV; Supplier 1: Mouser; RoHS: Yes; Category: Voltage Regulators - Switching; Stock 1: 340; Pricing 1: 1=2.94, 10=2.64, 50=2.49, 100=2.16, 1000=1.83, 10000=1.51 (USD); Case/Package: TSSOP; Pins: 8; Weight: 0.001376oz; Min Operating Temperature: -40°C; Max Operating Temperature: 85°C; Package Quantity: 150; Series: -; Packaging: Rail/Tube; Length: 3.1mm; Height: 1mm; Radiation Hardening: No; Lead Free: Lead Free; RoHS Compliant: Yes; Reach SVHC Compliant: No; ComponentLink1URL: https://datasheet.ciiva.com/4881/slvs570a-120490-4881281.pdf?src-supplier=Mouser; ComponentLink1Description: https://datasheet.ciiva.com/4881/slvs570a-120490-4881281.pdf?src-supplier=Mouser; ComponentLink2URL: https://datasheet.ciiva.com/15103/getdatasheetpartid-214826-15103993.pdf?src-supplier=Verical; ComponentLink2Description: https://datasheet.ciiva.com/15103/getdatasheetpartid-214826-15103993.pdf?src-supplier=Verical; ComponentLink3URL: https://datasheet.ciiva.com/1941/tps2377-1-1941821.pdf?src-supplier=Digi-Key; ComponentLink3Description: https://datasheet.ciiva.com/1941/tps2377-1-1941821.pdf?src-supplier=Digi-Key; Supplier Part Number 1: 595-TPS2375PW-1; LCSC Part Number: C202190; Item Type: IC
footprint 8-TSSOP (IC SENSOR THERMAL 3.0V 8TSSOP)
pins: 1 ILIM "Connect a resistor from ILIM to VSS to set the start-up inrush current limit. The equation for calculating the resistor is shown in the detailed pin description section for ILIM.", 2 CLASS "Connect a resistor from CLASS to VSS to set the classification of the powered device  (PD).", 3 DET "Connect a 24.9-k ohm detection resistor from DET to VDD for a valid PD detection.", 4 VSS "Return line on the source side of the TPS2375-1 from the PSE.", 5 RTN "Switched output side return line used as the low-side reference for the TPS2375-1 load.", 6 PG "Open-drain, power-good output; active high.", 7 NC "No connection", 8 VDD "Positive line from the rectified PSE provided input."

## TPS3700DDCR
designator U?
SOT-23-6 Comparators ROHS; Manufacturer: Texas Instruments; Manufacturer Part Number: TPS3700DDCR; Item Type: IC; Package: SOT-23-6; LCSC Part Number: C33002; ComponentLink5URL: https://www.lcsc.com/product-detail/Comparators_Texas-Instruments-TPS3700DDCR_C33002.html; ComponentLink5Description: LCSC
footprint SOT-23-6
pins: 1 OUTA, 2 GND, 3 INA+, 4 INB-, 5 VDD, 6 OUTB

## TPS5430DDAR
designator U?
IC REG BUCK ADJ 3A 8SOPWRPAD; Manufacturer: Texas Instruments; Manufacturer Part Number: TPS5430DDAR; Number of Outputs: 1; Output Voltage: 31V; Min Input Voltage: 5.5V; Max Supply Voltage: 36V; Efficiency: 95%; Switching Frequency: 500kHz; Synchronous Rectifier: No; Quiescent Current: 3mA; Output Type: Adjustable; Min Output Voltage: 1.22V; Supplier 1: Mouser; RoHS: Yes; Category: Voltage Regulators - Switching; Stock 1: 22539; Pricing 1: 1=4.49, 10=4.03, 50=3.81, 100=3.3, 1000=2.4, 10000=2.31 (USD); Mounting Technology: Surface Mount; Case/Package: HSOP; Pins: 8; Weight: 0.00249oz; Min Operating Temperature: -40°C; Max Operating Temperature: 125°C; Packaging: Tape and Reel; Max Output current: 3A; Output Current: 3A; Package Quantity: 1; Operating Supply Voltage: 36V; Series: SWIFT™; Max Output Voltage: 31V; Length: 5mm; Width: 4mm; Height: 1.55mm; Radiation Hardening: No; Lead Free: Lead Free; RoHS Compliant: Yes; ComponentLink1URL: https://datasheet.ciiva.com/27052/1523997-27052321.pdf?src-supplier=Jameco; ComponentLink1Description: https://datasheet.ciiva.com/27052/1523997-27052321.pdf?src-supplier=Jameco; ComponentLink2URL: https://datasheet.ciiva.com/15113/getdatasheetpartid-214658-15113401.pdf?src-supplier=Verical; ComponentLink2Description: https://datasheet.ciiva.com/15113/getdatasheetpartid-214658-15113401.pdf?src-supplier=Verical; ComponentLink3URL: https://datasheet.ciiva.com/41462/001014839-da-01-en-ic-reg-buck-adj-3-tps5430ddar-soic-8-tid-41462684.pdf?src-supplier=Conrad; ComponentLink3Description: https://datasheet.ciiva.com/41462/001014839-da-01-en-ic-reg-buck-adj-3-tps5430ddar-soic-8-tid-41462684.pdf?src-supplier=Conrad; ComponentLink4URL: https://datasheet.ciiva.com/2035/tps5431-2035207.pdf?src-supplier=Digi-Key; ComponentLink4Description: https://datasheet.ciiva.com/2035/tps5431-2035207.pdf?src-supplier=Digi-Key; ComponentLink5URL: https://datasheet.ciiva.com/2035/tps5431-2035206.pdf?src-supplier=Digi-Key; ComponentLink5Description: https://datasheet.ciiva.com/2035/tps5431-2035206.pdf?src-supplier=Digi-Key; ComponentLink6URL: https://datasheet.ciiva.com/2035/tps5431-2035208.pdf?src-supplier=Digi-Key; ComponentLink6Description: https://datasheet.ciiva.com/2035/tps5431-2035208.pdf?src-supplier=Digi-Key; ComponentLink7URL: https://datasheet.ciiva.com/3220/tps5430-3220197.pdf?src-supplier=Avnet; ComponentLink7Description: https://datasheet.ciiva.com/3220/tps5430-3220197.pdf?src-supplier=Avnet; Supplier Part Number 1: 595-TPS5430DDAR; LCSC Part Number: C9864; Item Type: IC
footprint 8-SOIC-EP
pins: 1 BOOT, 2 NC, 3 NC, 4 VSENSE, 5 ENA, 6 GND, 7 VIN, 8 PH, 9 GND

## TPS5450DDAR
designator U?
IC REG BUCK ADJUSTABLE 5A 8SOPWR; Manufacturer: Texas Instruments; Manufacturer Part Number: TPS5450DDAR; Min Input Voltage: 5.5V; Number of Outputs: 1; Output Voltage: 31V; Max Supply Voltage: 36V; Switching Frequency: 500kHz; Synchronous Rectifier: No; Quiescent Current: 3mA; Min Output Voltage: 1.22V; Efficiency: 90%; Supplier 1: Mouser; RoHS: Yes; Category: Voltage Regulators - Switching; Stock 1: 10304; Pricing 1: 1=5.44, 10=4.88, 50=4.62, 100=4, 1000=2.9, 10000=2.8 (USD); Mounting Technology: Surface Mount; Case/Package: HSOP; Pins: 8; Weight: 0.00249oz; Min Operating Temperature: -40°C; Max Operating Temperature: 125°C; Packaging: Tape and Reel; Package Quantity: 1; Max Output current: 5A; Output Current: 5A; Max Output Voltage: 31V; Operating Supply Voltage: 36V; Output Type: Adjustable; Series: SWIFT™; Length: 5mm; Width: 4mm; Height: 1.55mm; Radiation Hardening: No; Lead Free: Lead Free; RoHS Compliant: Yes; ComponentLink1URL: https://datasheet.ciiva.com/15113/getdatasheetpartid-172659-15113657.pdf?src-supplier=Verical; ComponentLink1Description: https://datasheet.ciiva.com/15113/getdatasheetpartid-172659-15113657.pdf?src-supplier=Verical; ComponentLink2URL: https://datasheet.ciiva.com/2035/tps5450-2035367.pdf?src-supplier=Digi-Key; ComponentLink2Description: https://datasheet.ciiva.com/2035/tps5450-2035367.pdf?src-supplier=Digi-Key; ComponentLink3URL: https://datasheet.ciiva.com/2035/tps5450-2035366.pdf?src-supplier=Digi-Key; ComponentLink3Description: https://datasheet.ciiva.com/2035/tps5450-2035366.pdf?src-supplier=Digi-Key; ComponentLink4URL: https://datasheet.ciiva.com/2035/tps5450-2035368.pdf?src-supplier=Digi-Key; ComponentLink4Description: https://datasheet.ciiva.com/2035/tps5450-2035368.pdf?src-supplier=Digi-Key; ComponentLink5URL: https://datasheet.ciiva.com/14303/tps5450-14303689.pdf?src-supplier=Avnet; ComponentLink5Description: https://datasheet.ciiva.com/14303/tps5450-14303689.pdf?src-supplier=Avnet; ComponentLink6URL: https://datasheet.ciiva.com/3220/tps5450-3220230.pdf?src-supplier=Avnet; ComponentLink6Description: https://datasheet.ciiva.com/3220/tps5450-3220230.pdf?src-supplier=Avnet; Supplier Part Number 1: 595-TPS5450DDAR; LCSC Part Number: C114425; Item type: IC
footprint 8-SO-EP_
pins: 1 BOOT, 2 NC, 3 NC, 4 VSENSE, 5 ENA, 6 GND, 7 VIN, 8 PH, 9 GND

## TPS53319DQPR
designator U?
IC REG BUCK ADJUSTABLE 14A 22SON; Manufacturer: Texas Instruments; Manufacturer Part Number: TPS53319DQPR; Output Voltage: 5.5V; Switching Frequency: 1MHz; Min Input Voltage: 1.5V; Max Input Voltage: 22V; Number of Outputs: 1; Synchronous Rectifier: Yes; Min Output Voltage: 600mV; Quiescent Current: 320uA; Output Configuration: Positive; Efficiency: 91%; Supplier 1: Newark; RoHS: Yes; Category: Voltage Regulators - Switching; Mount: Surface Mount; Case/Package: SON; Number of Pins: 22; Contact Plating: Gold; Min Operating Temperature: -40°C; Max Operating Temperature: 85°C; Output Current: 14A; Package Quantity: 2500; Series: D-CAP™, Eco-Mode™; Packaging: Tape and Reel; Max Output Voltage: 5.5V; Output Type: Adjustable; Max Output Current: 14A; Radiation Hardening: No; Lead Free: Contains Lead; RoHS Compliant: Yes; ComponentLink1URL: https://datasheet.ciiva.com/6605/tps53318-6605682.pdf?src-supplier=Digi-Key; ComponentLink1Description: https://datasheet.ciiva.com/6605/tps53318-6605682.pdf?src-supplier=Digi-Key; ComponentLink2Description: LCSC; ComponentLink2URL: https://www.lcsc.com/product-detail/DC-DC-Converters_Texas-Instruments-TPS53319DQPR_C181971.html; LCSC Part Number: C181971; Item Type: IC
footprint 22-LSON-CLIP (6x5)
pins: 1 VFB, 2 EN, 3 PGOOD, 4 VBST, 5 ROVP, 6 LL, 7 LL, 8 LL, 9 LL, 10 LL, 11 LL, 12 VIN, 13 VIN, 14 VIN, 15 VIN, 16 VIN, 17 VIN, 18 VREG, 19 VDD, 20 MODE, 21 TRIP, 22 RF, 23 GND

## TPS54240DGQR
designator U?
IC REG BCK SPLIT RAIL ADJ 10MSOP; Manufacturer: Texas Instruments; Manufacturer Part Number: TPS54240DGQR; Switching Frequency: 2.5MHz; Output Voltage: 39V; Output Current: 2.5A; Number of Outputs: 1; Max Supply Voltage: 42V; Min Input Voltage: 3.5V; Synchronous Rectifier: No; Min Output Voltage: 800mV; Quiescent Current: 138uA; Topology: Buck-Boost; Output Type: Adjustable; Supplier 1: Digi-Key; RoHS: Yes; Category: Voltage Regulators - Switching; Pricing 1: 1=3.26000, 10=2.93100, 25=2.77120, 100=2.40190, 250=2.27868, 500=2.04466, 1000=1.74300 (USD); Case/Package: HVSSOP; Pins: 10; Contact Plating: Gold; Min Operating Temperature: -40°C; Max Operating Temperature: 125°C; Packaging: Tape and Reel; Package Quantity: 1; Max Output current: 2.5A; Max Output Voltage: 39V; Series: SWIFT™, Eco-Mode™; Min Supply Voltage: 3.5V; Operating Supply Voltage: 42V; Length: 3.1mm; Width: 3.1mm; Height: 0.95mm; Radiation Hardening: No; Reach SVHC Compliant: Yes; Lead Free: Lead Free; RoHS Compliant: Yes; ComponentLink1URL: https://datasheet.ciiva.com/2026/tps54240-2026016.pdf?src-supplier=Digi-Key; ComponentLink1Description: https://datasheet.ciiva.com/2026/tps54240-2026016.pdf?src-supplier=Digi-Key; ComponentLink2URL: https://datasheet.ciiva.com/41462/001014834-da-01-en-ic-reg-buck-ad-tps54240dgqr-vssop-10-tid-41462681.pdf?src-supplier=Conrad; ComponentLink2Description: https://datasheet.ciiva.com/41462/001014834-da-01-en-ic-reg-buck-ad-tps54240dgqr-vssop-10-tid-41462681.pdf?src-supplier=Conrad; ComponentLink3URL: https://datasheet.ciiva.com/2026/tps54240-2026015.pdf?src-supplier=Digi-Key; ComponentLink3Description: https://datasheet.ciiva.com/2026/tps54240-2026015.pdf?src-supplier=Digi-Key; ComponentLink4URL: https://datasheet.ciiva.com/2026/tps54240-2026014.pdf?src-supplier=Digi-Key; ComponentLink4Description: https://datasheet.ciiva.com/2026/tps54240-2026014.pdf?src-supplier=Digi-Key; ComponentLink5URL: https://datasheet.ciiva.com/14378/slvsaa6-14378059.pdf?src-supplier=Avnet; ComponentLink5Description: https://datasheet.ciiva.com/14378/slvsaa6-14378059.pdf?src-supplier=Avnet; Supplier Part Number 1: 296-27414-1-ND; LCSC Part Number: C53213; Item Type: IC
footprint 10-HVSSOP - New (IC BATT CHG LI-ION 1CELL 10MSOP)
pins: 1 BOOT, 2 VIN, 3 EN, 4 SS/TR, 5 RT/CLK, 6 PWRGD, 7 VSENSE, 8 COMP, 9 GND, 10 PH, 11 GND

## TPS54620RHLR
designator U?
IC REG BUCK ADJUSTABLE 6A 14VQFN; Manufacturer: Texas Instruments; Manufacturer Part Number: TPS54620RHLR; Number of Outputs: 1; Output Voltage: 15V; Min Input Voltage: 1.6V; Max Input Voltage: 17V; Switching Frequency: 1.6MHz; Min Supply Voltage: 4.5V; Synchronous Rectifier: Yes; Min Output Voltage: 800mV; Quiescent Current: 600uA; Supplier 1: Digi-Key; RoHS: Yes; Category: Voltage Regulators - Switching; Pricing 1: 1=5.80000, 10=5.20700, 25=4.92280, 100=4.26630, 250=4.04752, 500=3.63182, 1000=3.61200 (USD); Mount: Surface Mount; Case/Package: QFN; Number of Pins: 14; Contact Plating: Gold; Min Operating Temperature: -40°C; Max Operating Temperature: 150°C; Max Output Current: 6A; Operating Supply Voltage: 17V; Output Current: 6A; Packaging: Tape and Reel; Package Quantity: 3000; Max Output Voltage: 15V; Output Type: Adjustable; Series: SWIFT™; Length: 3.65mm; Width: 3.65mm; Height: 0.95mm; Radiation Hardening: No; REACH SVHC: No SVHC; Lead Free: Lead Free; RoHS Compliant: Yes; ComponentLink1URL: https://datasheet.ciiva.com/2026/tps54620-2026364.pdf?src-supplier=Digi-Key; ComponentLink1Description: https://datasheet.ciiva.com/2026/tps54620-2026364.pdf?src-supplier=Digi-Key; ComponentLink2URL: https://datasheet.ciiva.com/22716/1781687-22716300.pdf?src-supplier=Element14; ComponentLink2Description: https://datasheet.ciiva.com/22716/1781687-22716300.pdf?src-supplier=Element14; ComponentLink3URL: https://datasheet.ciiva.com/2026/tps54620-2026365.pdf?src-supplier=Digi-Key; ComponentLink3Description: https://datasheet.ciiva.com/2026/tps54620-2026365.pdf?src-supplier=Digi-Key; ComponentLink4URL: https://datasheet.ciiva.com/26101/tps54620-26101515.pdf?src-supplier=Avnet+Europe; ComponentLink4Description: https://datasheet.ciiva.com/26101/tps54620-26101515.pdf?src-supplier=Avnet+Europe; ComponentLink5URL: https://datasheet.ciiva.com/3221/tps54620-3221357.pdf?src-supplier=Avnet; ComponentLink5Description: https://datasheet.ciiva.com/3221/tps54620-3221357.pdf?src-supplier=Avnet; ComponentLink6URL: https://datasheet.ciiva.com/2026/tps54620-2026366.pdf?src-supplier=Digi-Key; ComponentLink6Description: https://datasheet.ciiva.com/2026/tps54620-2026366.pdf?src-supplier=Digi-Key; Supplier Part Number 1: 296-28831-1-ND; LCSC Part Number: C263274; Item Type: IC
footprint 14-VQFN (3.5x3.5)_
pins: 1 RT/CLK, 2 GND, 3 GND, 4 PVIN, 5 PVIN, 6 VIN, 7 VSENSE, 8 COMP, 9 SS/TR, 10 EN, 11 PH, 12 PH, 13 BOOT, 14 PWRGD, 15 GND

## TPS60150DRVR
designator U?
IC REG CHARGE PUMP 5V 140MA 6SON; Manufacturer: Texas Instruments; Manufacturer Part Number: TPS60150DRVR; Number of Outputs: 1; Max Input Voltage: 5.5V; Min Input Voltage: 2.7V; Switching Frequency: 1.5MHz; Synchronous Rectifier: No; Min Output Voltage: 4.8V; Quiescent Current: 4.7mA; Max Output Voltage: 5.2V; Output Type: Fixed; Nominal Supply Current: 90uA; Topology: Boost; Supplier 1: Digi-Key; RoHS: Yes; Category: Voltage Regulators - Switching; Pricing 1: 1=1.69000, 10=1.51400, 25=1.42840, 100=1.21700, 250=1.14268, 500=0.99984, 1000=0.94325 (USD); Case/Package: SON; Number of Pins: 6; Contact Plating: Gold; Min Operating Temperature: -40°C; Max Operating Temperature: 85°C; Packaging: Tape and Reel; Output Voltage: 5V; Output Current: 140mA; Package Quantity: 1; Max Output Current: 140mA; Series: -; Max Supply Voltage: 5.5V; Min Supply Voltage: 2.7V; Nominal Output Voltage: 5V; Supply Current: 90uA; Radiation Hardening: No; REACH SVHC: No SVHC; Lead Free: Lead Free; RoHS Compliant: Yes; ComponentLink1URL: https://datasheet.ciiva.com/15114/getdatasheetpartid-358100-15114131.pdf?src-supplier=Verical; ComponentLink1Description: https://datasheet.ciiva.com/15114/getdatasheetpartid-358100-15114131.pdf?src-supplier=Verical; ComponentLink2URL: https://datasheet.ciiva.com/4874/slvs888b-120916-4874885.pdf?src-supplier=Mouser; ComponentLink2Description: https://datasheet.ciiva.com/4874/slvs888b-120916-4874885.pdf?src-supplier=Mouser; ComponentLink3URL: https://datasheet.ciiva.com/26902/tps60150drvr-26902693.pdf?src-supplier=IIIC; ComponentLink3Description: https://datasheet.ciiva.com/26902/tps60150drvr-26902693.pdf?src-supplier=IIIC; ComponentLink4URL: https://datasheet.ciiva.com/41462/001014874-da-01-en-ic-reg-switched-tps60150drvr-wson-6-tid-41462718.pdf?src-supplier=Conrad; ComponentLink4Description: https://datasheet.ciiva.com/41462/001014874-da-01-en-ic-reg-switched-tps60150drvr-wson-6-tid-41462718.pdf?src-supplier=Conrad; ComponentLink5URL: https://datasheet.ciiva.com/22669/1828381-22669637.pdf?src-supplier=Element14; ComponentLink5Description: https://datasheet.ciiva.com/22669/1828381-22669637.pdf?src-supplier=Element14; ComponentLink6URL: https://datasheet.ciiva.com/2025/tps60150-2025302.pdf?src-supplier=Digi-Key; ComponentLink6Description: https://datasheet.ciiva.com/2025/tps60150-2025302.pdf?src-supplier=Digi-Key; ComponentLink7URL: https://datasheet.ciiva.com/2025/tps60150-2025303.pdf?src-supplier=Digi-Key; ComponentLink7Description: https://datasheet.ciiva.com/2025/tps60150-2025303.pdf?src-supplier=Digi-Key; ComponentLink8URL: https://datasheet.ciiva.com/2025/tps60150-2025304.pdf?src-supplier=Digi-Key; ComponentLink8Description: https://datasheet.ciiva.com/2025/tps60150-2025304.pdf?src-supplier=Digi-Key; ComponentLink9URL: https://datasheet.ciiva.com/46382/1828381-46382472.pdf?src-supplier=Element14; ComponentLink9Description: https://datasheet.ciiva.com/46382/1828381-46382472.pdf?src-supplier=Element14; ComponentLink10URL: https://datasheet.ciiva.com/3215/tps60150-3215851.pdf?src-supplier=Avnet; ComponentLink10Description: https://datasheet.ciiva.com/3215/tps60150-3215851.pdf?src-supplier=Avnet; ComponentLink11URL: https://datasheet.ciiva.com/14320/tps60150-14320303.pdf?src-supplier=Avnet; ComponentLink11Description: https://datasheet.ciiva.com/14320/tps60150-14320303.pdf?src-supplier=Avnet; Supplier Part Number 1: 296-24054-6-ND; LCSC Part Number: C182429; Item Type: IC
footprint 6-WSON (2x2)
pins: 1 GND, 2 VIN, 3 VOUT, 4 CP+, 5 CP-, 6 ENA, 7 GND

## TPS61022RWUR
designator U?
8-A boost converter with 0.5-V ultra-low input voltage 7-VQFN-HR -40 to 125; Manufacturer: Texas Instruments; Manufacturer Part Number: TPS61022RWUR; Item Type: IC; Supplier 1: Digi-Key; RoHS: Yes; Category: Voltage Regulators - Switching; Pricing 1: 1=1.88000, 10=1.68800, 25=1.59280, 100=1.35690, 250=1.27412, 500=1.11486, 1000=0.92374 (USD); Supplier Part Number 1: 296-TPS61022RWURDKR-ND; ComponentLink1Description: LCSC; ComponentLink1URL: https://www.lcsc.com/product-detail/DC-DC-Converters_Texas-Instruments-TPS61022RWUR_C915088.html; LCSC Part Number: C915088
footprint 7-VQFN-HR (2x2)
pins: 1 GND, 2 SW, 3 VOUT, 4 FB, 5 EN, 6 MODE, 7 VIN